# Altium schematic symbol library VEML7700Q.SchLib: 1 symbol
Pins are listed as number, name and electrical type; pins without a type are passive.

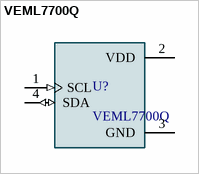
[diagram p0: symbol VEML7700Q]

## VEML7700Q
designator U?
Optical Sensor Ambient - IÂ²C 4-SMD, J-Lead; MF: Vishay Semiconductor; MP: VEML7700-TT; SnapEDA_Link: https://www.snapeda.com/parts/VEML7700-TT/Vishay+Semiconductor+Opto+Division/view-part/?ref=snap; Package: SMD-4 Vishay Semiconductor; Value: VEML7700Q; Check_prices: https://www.snapeda.com/parts/VEML7700-TT/Vishay+Semiconductor+Opto+Division/view-part/?ref=eda
footprint VEML7700Q (XDCR_VEML7700-TT)
pins: 1 SCL (in), 2 VDD (power), 3 GND (power), 4 SDA (io)